# Altium footprint library DIO_BZT52C12-7-F.PcbLib: 1 footprints
Each footprint in its own frame and in the unit in brackets; x right, y up, seen from the top. Pads: shape width x height; smd on the part's side, far side on the other; paste and mask are expansions set on the pad; w line width, h text height; cw(c..) or ccw(c..) is an arc to the next point about the centre after c.
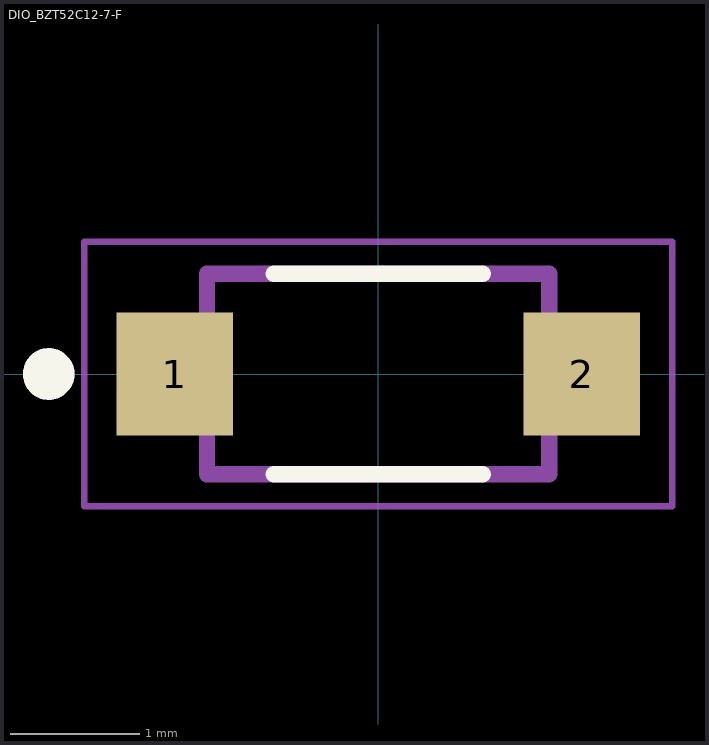
[diagram p0: the footprint, top view; thin cyan lines are the x and y axes]

## DIO_BZT52C12-7-F [mm]
height 1.45
pads (2):
  rect 0.9x0.95 smd paste+0 mask+0.102: 1(-1.575,0) 2(1.575,0)
Top Overlay:
  circle w0.2: c-2.55,0 r0.1
  lines w0.127: -0.81,-0.775 0.81,-0.775 ; -0.81,0.775 0.81,0.775
Assembly Top:
  circle w0.2: c-2.55,0 r0.1
  lines w0.127: -1.325,-0.775 1.325,-0.775 1.325,0.775 -1.325,0.775 -1.325,-0.775
Courtyard Top:
  lines w0.05: -2.275,-1.025 2.275,-1.025 2.275,1.025 -2.275,1.025 -2.275,-1.025
3D body "step_temp.STEP": height 1.35, standoff 0, extent -1.85,-0.775 1.85,0.775